# Altium footprint library TLP182BL-TPL,E.PcbLib: 1 footprints
Each footprint in its own frame and in the unit in brackets; x right, y up, seen from the top. Pads: shape width x height; smd on the part's side, far side on the other; paste and mask are expansions set on the pad; w line width, h text height; cw(c..) or ccw(c..) is an arc to the next point about the centre after c.
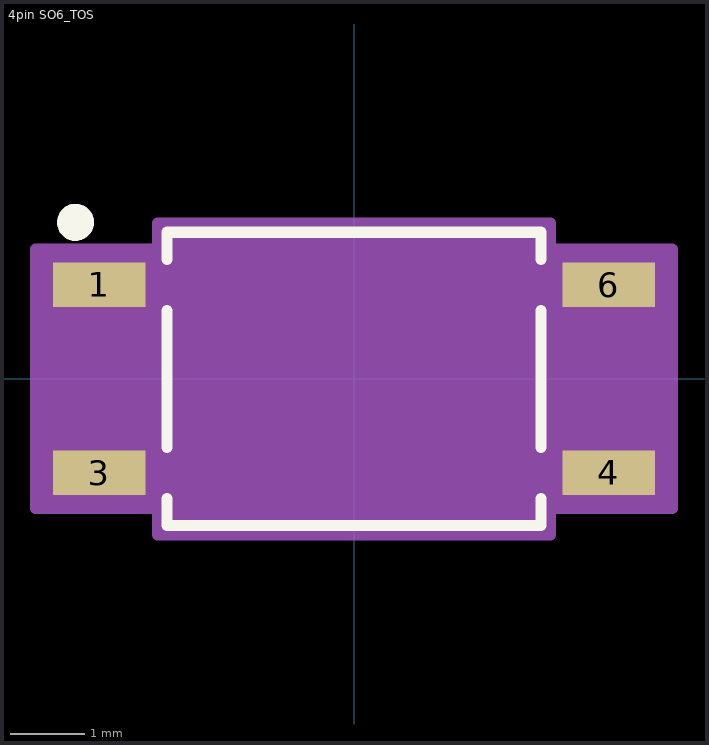
[diagram p0: the footprint, top view; thin cyan lines are the x and y axes]

## 4pin SO6_TOS [mm]
pads (4):
  rect 1.25x0.6 smd paste+0 mask+0: 1(-3.442,1.27) 3(-3.442,-1.27) 4(3.442,-1.27) 6(3.442,1.27)
Top Overlay:
  circle w0.25: c-3.764,2.116 r0.125
  lines w0.152: -2.527,-1.618 -2.527,-1.981 2.527,-1.981 2.527,-1.618 ; -2.527,-0.922 -2.527,0.922 ; -2.527,1.618 -2.527,1.981 2.527,1.981 2.527,1.618 ; 2.527,-0.922 2.527,0.922
Mechanical 13:
  lines w0: -0.305,1.854 ccw(c0,1.854) 0.305,1.854
  lines w0.025: -3.696,-1.473 -2.4,-1.473 -2.4,-1.067 -3.696,-1.067 -3.696,-1.473 ; -3.696,1.067 -2.4,1.067 -2.4,1.473 -3.696,1.473 -3.696,1.067 ; -2.4,-1.854 -2.4,1.854 2.4,1.854 2.4,-1.854 -2.4,-1.854 ; 2.4,-1.473 3.696,-1.473 3.696,-1.067 2.4,-1.067 2.4,-1.473 ; 2.4,1.067 3.696,1.067 3.696,1.473 2.4,1.473 2.4,1.067
  text "*" at -2.337,0.508 h1.27
Mechanical 15:
  region: -2.654,-1.752 -4.3,-1.752 -4.3,1.752 -2.654,1.752 -2.654,2.108 2.654,2.108 2.654,1.752 4.3,1.752 4.3,-1.752 2.654,-1.752 2.654,-2.108 -2.654,-2.108
  lines w0.152: -4.3,-1.752 -2.654,-1.752 -2.654,-2.108 2.654,-2.108 2.654,-1.752 4.3,-1.752 4.3,1.752 2.654,1.752 2.654,2.108 -2.654,2.108 -2.654,1.752 -4.3,1.752 -4.3,-1.752
3D body "TLP182(E.STEP": height 2.3, standoff 0, extent -3.5,-1.85 3.5,1.85